# Altium integrated library 7_seg.IntLib: 1 symbol
Pins are listed as number, name and electrical type; pins without a type are passive.

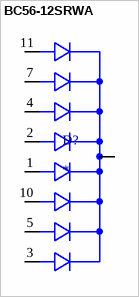
[diagram p0: symbol BC56-12SRWA]

## BC56-12SRWA
designator D?
Display Modules - LED Character and Numeric Red 7-Segment 3 Character Common Cathode 1.85V 20mA 1.480 H x 0.748 W x 0.319 D (37.60mm x 19.00mm x 8.10mm) 12-DIP (0.600, 15.24mm); MF: Kingbright; MP: BC56-12SRWA; SnapEDA_Link: https://www.snapeda.com/parts/BC56-12SRWA/Kingbright/view-part/?ref=snap; Package: None; Value: *; Check_prices: https://www.snapeda.com/parts/BC56-12SRWA/Kingbright/view-part/?ref=eda
footprint LED_BC56-12SRWA
pins: 1 E, 2 D, 3 DP, 4 C, 5 G, 7 B, 8 COMMON_CATHODE, 9 COMMON_CATHODE, 10 F, 11 A, 12 COMMON_CATHODE